# Altium schematic symbol library Connectors.SchLib: 2 symbols
Pins are listed as number, name and electrical type; pins without a type are passive.

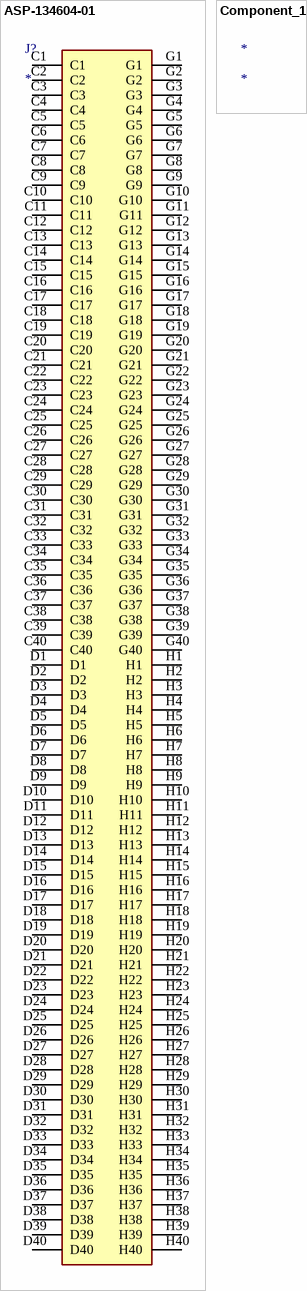
[diagram p0: symbols ASP-134604-01 to Component_1]

## ASP-134604-01
designator J?
Connector; Manufacturer_Name: SAMTEC; Manufacturer_Part_Number: ASP-134604-01; Description: SAMTEC - ASP-134604-01 - Board-To-Board Connector; Datasheet Link: https://componentsearchengine.com/Datasheets/2/ASP-134604-01.pdf; Height: 7.11mm; Mouser Part Number: 200-ASP-134604-01; Mouser Price/Stock: https://www.mouser.co.uk/ProductDetail/Samtec/ASP-134604-01?qs=Rp%2FUEJiACm00i8g2mQ6XNw%3D%3D; Arrow Part Number: ASP-134604-01; Arrow Price/Stock: https://www.arrow.com/en/products/asp-134604-01/samtec.html?utm_currency=USD&region=nac
footprint ASP13460401
pins: C1, C2, C3, C4, C5, C6, C7, C8, C9, C10, C11, C12, C13, C14, C15, C16, C17, C18, C19, C20, C21, C22, C23, C24, C25, C26, C27, C28, C29, C30, C31, C32, C33, C34, C35, C36, C37, C38, C39, C40, D1, D2, D3, D4, D5, D6, D7, D8, D9, D10, D11, D12, D13, D14, D15, D16, D17, D18, D19, D20, D21, D22, D23, D24, D25, D26, D27, D28, D29, D30, D31, D32, D33, D34, D35, D36, D37, D38, D39, D40, G1, G2, G3, G4, G5, G6, G7, G8, G9, G10, G11, G12, G13, G14, G15, G16, G17, G18, G19, G20, G21, G22, G23, G24, G25, G26, G27, G28, G29, G30, G31, G32, G33, G34, G35, G36, G37, G38, G39, G40, H1, H2, H3, H4, H5, H6, H7, H8, H9, H10, H11, H12, H13, H14, H15, H16, H17, H18, H19, H20, H21, H22, H23, H24, H25, H26, H27, H28, H29, H30, H31, H32, H33, H34, H35, H36, H37, H38, H39, H40

## Component_1
designator *